# EAGLE library part CDP1861 (library cdp)
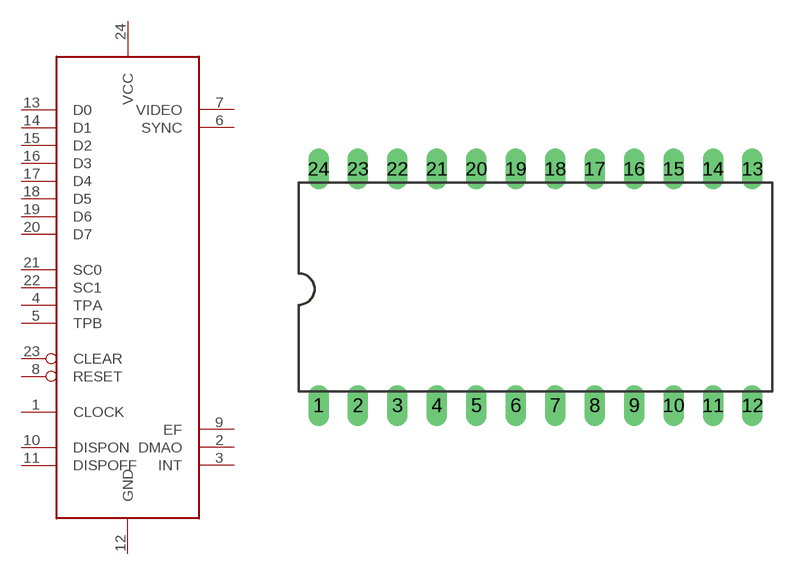
[diagram p3: symbol with the pads of DIP24; footprint DIP24]

Designator prefix -

## CDP1861  [DIP24]
1  CLOCK
2  DMAO
3  INT
4  TPA
5  TPB
6  SYNC
7  VIDEO
8  RESET
9  EF
10  DISPON
11  DISPOFF
12  GND
13  D0
14  D1
15  D2
16  D3
17  D4
18  D5
19  D6
20  D7
21  SC0
22  SC1
23  CLEAR
24  VCC

## Footprint DIP24 (pad centres in mm)
drill 0.813 long: 1 -12.7,-7.62; 2 -10.16,-7.62; 3 -7.62,-7.62; 4 -5.08,-7.62; 5 -2.54,-7.62; 6 0,-7.62; 7 2.54,-7.62; 8 5.08,-7.62; 9 7.62,-7.62; 10 10.16,-7.62; 11 12.7,-7.62; 12 15.24,-7.62; 13 15.24,7.62; 14 12.7,7.62; 15 10.16,7.62; 16 7.62,7.62; 17 5.08,7.62; 18 2.54,7.62; 19 0,7.62; 20 -2.54,7.62; 21 -5.08,7.62; 22 -7.62,7.62; 23 -10.16,7.62; 24 -12.7,7.62